# Altium schematic symbol library 0.75 0805 resistor.SchLib: 1 symbol
Pins are listed as number, name and electrical type; pins without a type are passive.

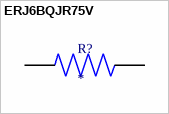
[diagram p0: symbol ERJ6BQJR75V]

## ERJ6BQJR75V
designator R?
MP: ERJ6BQJR75V; Value: *; Availability: Unavailable; Price: None; Package: None
footprint RES_ERJ6BQJR75V
pins: 1, 2